# Altium footprint library vm_cutoff.PcbLib: 3 footprints
Each footprint in its own frame and in the unit in brackets; x right, y up, seen from the top. Pads: shape width x height; smd on the part's side, far side on the other; paste and mask are expansions set on the pad; w line width, h text height; cw(c..) or ccw(c..) is an arc to the next point about the centre after c.
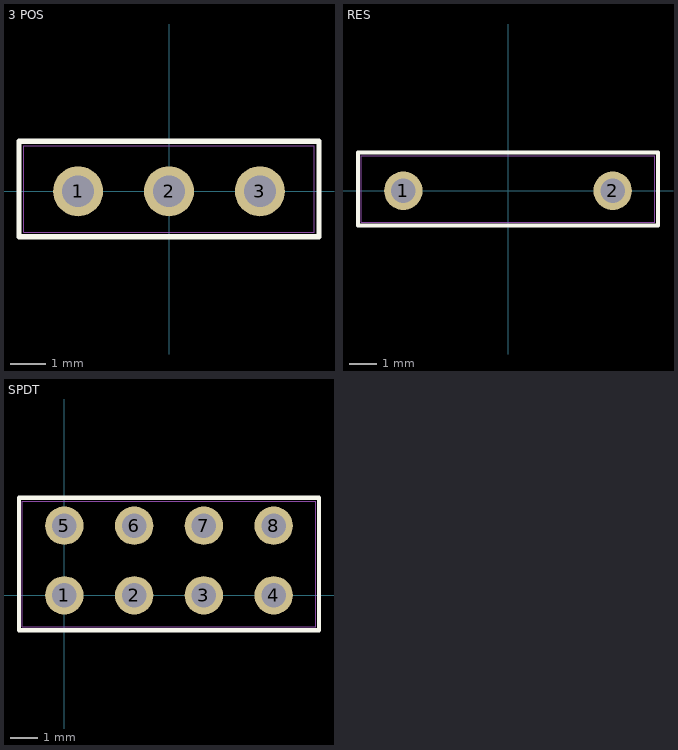
[diagram p0: the footprints below, top view; thin cyan lines are the x and y axes]

## 3 POS [mil]
pads (3):
  round 55 hole 35 paste-99999 mask+0: 1(-100,0) 2(0,0) 3(100,0)
Top Overlay:
  lines w6: -165,-50 -165,55 165,55 165,-50 -165,-50
Top 3D Body:
  circle w1: c-100,0 r10
  lines w1: -160,-45 -160,50 160,50 160,-45 -160,-45

## RES [mil]
pads (2):
  round 55 hole 35 paste-99999 mask+0: 1(-150,0) 2(150,0)
Top Overlay:
  lines w6: -215,-50 -215,55 215,55 215,-50 -215,-50
Top 3D Body:
  circle w1: c-150,0 r10
  lines w1: -210,-45 -210,50 210,50 210,-45 -210,-45

## SPDT [mil]
pads (8):
  round 55 hole 35 paste-99999 mask+0: 1(0,0) 2(100,0) 3(200,0) 4(300,0) 5(0,100) 6(100,100) 7(200,100) 8(300,100)
Top Overlay:
  lines w6: -65,-50 365,-50 365,140 -65,140 -65,-50
Top 3D Body:
  circle w1: c0,0 r10
  circle w1: c0,100 r10
  lines w1: -60,-45 -60,135 360,135 360,-45 -60,-45